# Altium footprint library SamacSys.PcbLib: 1008 footprints (part 40 of 63)
Each footprint in its own frame and in the unit in brackets; x right, y up, seen from the top. Pads: shape width x height; smd on the part's side, far side on the other; paste and mask are expansions set on the pad; w line width, h text height; cw(c..) or ccw(c..) is an arc to the next point about the centre after c.
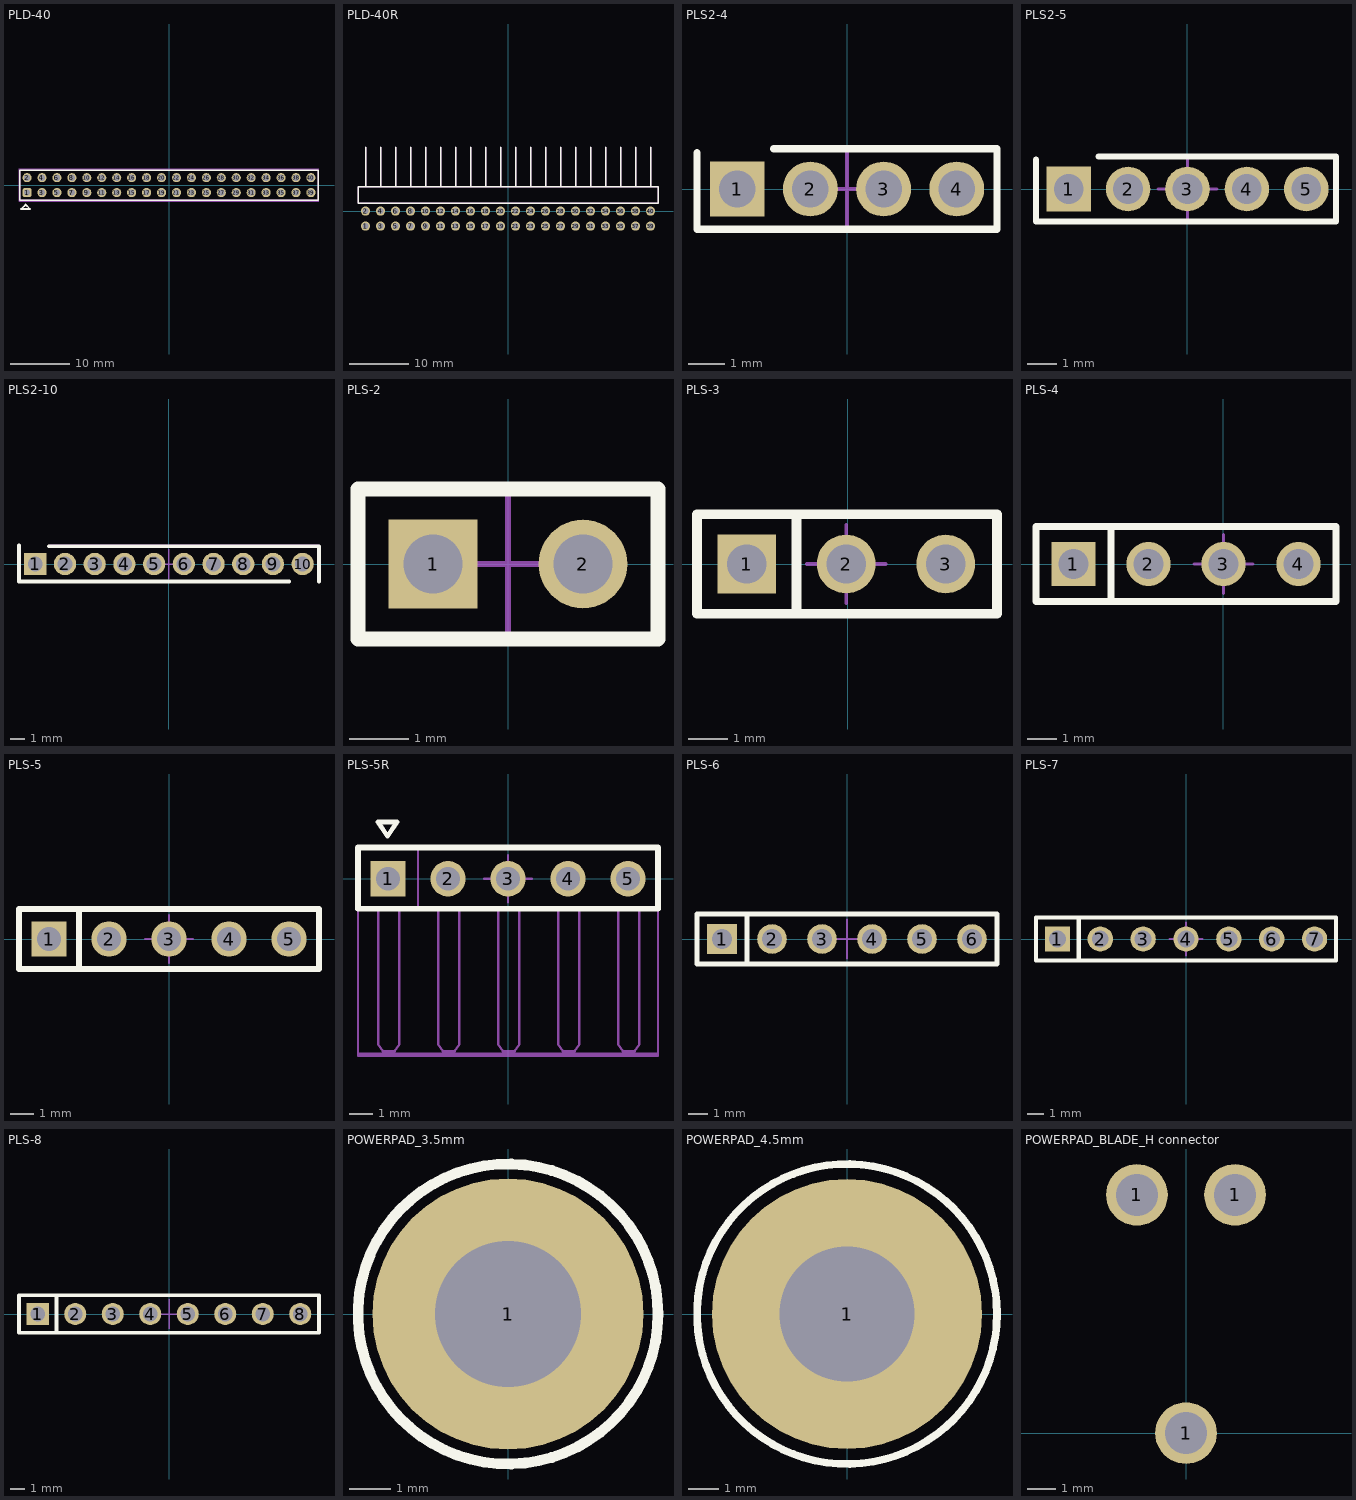
[diagram p39: the footprints below, top view; thin cyan lines are the x and y axes]

## PLD-40 [mm]
pads (40):
  rrect50% 1.55x1.55 hole 1.05: 1(-24.13,-1.27)
  round 1.55 hole 1.05: 2(-24.13,1.27) 3(-21.59,-1.27) 4(-21.59,1.27) 5(-19.05,-1.27) 6(-19.05,1.27) 7(-16.51,-1.27) 8(-16.51,1.27) 9(-13.97,-1.27) 10(-13.97,1.27) 11(-11.43,-1.27) 12(-11.43,1.27) 13(-8.89,-1.27) 14(-8.89,1.27) 15(-6.35,-1.27) 16(-6.35,1.27) 17(-3.81,-1.27) 18(-3.81,1.27) 19(-1.27,-1.27) 20(-1.27,1.27) 21(1.27,-1.27) 22(1.27,1.27) 23(3.81,-1.27) 24(3.81,1.27) 25(6.35,-1.27) 26(6.35,1.27) 27(8.89,-1.27) 28(8.89,1.27) 29(11.43,-1.27) 30(11.43,1.27) 31(13.97,-1.27) 32(13.97,1.27) 33(16.51,-1.27) 34(16.51,1.27) 35(19.05,-1.27) 36(19.05,1.27) 37(21.59,-1.27) 38(21.59,1.27) 39(24.13,-1.27) 40(24.13,1.27)
Top Overlay:
  lines w0.254: -25.4,-2.54 -25.4,2.57 25.4,2.57 25.4,-2.54 -25.4,-2.54
  lines w0.3: -25.146,-4.064 -23.622,-4.064 -24.384,-3.302 -25.146,-4.064
Top Assembly:
  lines w0.1: -25.5,-2.75 25.5,-2.75 25.5,2.75 -25.5,2.75 -25.5,-2.75
Top Courtyard:
  lines w0.1: -25.5,-2.75 -25.5,2.75 25.5,2.75 25.5,-2.75 -25.5,-2.75
Assembly:
  lines w0.254: -25.4,-2.54 25.4,-2.54 25.4,2.57 -25.4,2.57 -25.4,-2.54
3D body "User Library-PLD10.STEP": height 8.54, standoff -3, extent -25.4,-2.54 -12.7,2.54
3D body "User Library-PLD10.STEP": height 8.54, standoff -3, extent -12.7,-2.54 0,2.54
3D body "User Library-PLD10.STEP": height 8.54, standoff -3, extent 0,-2.54 12.7,2.54
3D body "User Library-PLD10.STEP": height 8.54, standoff -3, extent 12.7,-2.54 25.4,2.54

## PLD-40R [mm]
pads (40):
  round 1.55 hole 1.05: 1(-24.13,-2.54) 2(-24.13,0) 3(-21.59,-2.54) 4(-21.59,0) 5(-19.05,-2.54) 6(-19.05,0) 7(-16.51,-2.54) 8(-16.51,0) 9(-13.97,-2.54) 10(-13.97,0) 11(-11.43,-2.54) 12(-11.43,0) 13(-8.89,-2.54) 14(-8.89,0) 15(-6.35,-2.54) 16(-6.35,0) 17(-3.81,-2.54) 18(-3.81,0) 19(-1.27,-2.54) 20(-1.27,0) 21(1.27,-2.54) 22(1.27,0) 23(3.81,-2.54) 24(3.81,0) 25(6.35,-2.54) 26(6.35,0) 27(8.89,-2.54) 28(8.89,0) 29(11.43,-2.54) 30(11.43,0) 31(13.97,-2.54) 32(13.97,0) 33(16.51,-2.54) 34(16.51,0) 35(19.05,-2.54) 36(19.05,0) 37(21.59,-2.54) 38(21.59,0) 39(24.13,-2.54) 40(24.13,0)
Top Overlay:
  lines w0.254: -24.13,4.1 -24.13,10.8 ; -21.59,4.1 -21.59,10.8 ; -19.05,4.1 -19.05,10.8 ; -16.51,4.1 -16.51,10.8 ; -13.97,4.1 -13.97,10.8 ; -11.43,4.1 -11.43,10.8 ; -8.89,4.1 -8.89,10.8 ; -6.35,4.1 -6.35,10.8 ; -3.81,4.1 -3.81,10.8 ; -1.27,4.1 -1.27,10.8 ; 1.27,4.1 1.27,10.8 ; 3.81,4.1 3.81,10.8 ; 6.35,4.1 6.35,10.8 ; 8.89,4.1 8.89,10.8 ; 11.43,4.1 11.43,10.8 ; 13.97,4.1 13.97,10.8 ; 16.51,4.1 16.51,10.8 ; 19.05,4.1 19.05,10.8 ; 21.59,4.1 21.59,10.8 ; 24.13,4.1 24.13,10.8 ; -25.4,1.3 -25.4,4.1 25.4,4.1 25.4,1.3 -25.4,1.3
Assembly:
  lines w0.254: -24.13,4.1 -24.13,10.8 ; -21.59,4.1 -21.59,10.8 ; -19.05,4.1 -19.05,10.8 ; -16.51,4.1 -16.51,10.8 ; -13.97,4.1 -13.97,10.8 ; -11.43,4.1 -11.43,10.8 ; -8.89,4.1 -8.89,10.8 ; -6.35,4.1 -6.35,10.8 ; -3.81,4.1 -3.81,10.8 ; -1.27,4.1 -1.27,10.8 ; 1.27,4.1 1.27,10.8 ; 3.81,4.1 3.81,10.8 ; 6.35,4.1 6.35,10.8 ; 8.89,4.1 8.89,10.8 ; 11.43,4.1 11.43,10.8 ; 13.97,4.1 13.97,10.8 ; 16.51,4.1 16.51,10.8 ; 19.05,4.1 19.05,10.8 ; 21.59,4.1 21.59,10.8 ; 24.13,4.1 24.13,10.8 ; -25.4,1.3 25.4,1.3 25.4,4.1 -25.4,4.1 -25.4,1.3
3D body "2-826634-0.stp": height 5.36, standoff -3.39, extent -25.4,-2.955 25.4,10.7

## PLS2-4 [mm]
height 4.3
pads (4):
  rect 1.5x1.5 hole 1: 1(-3,0)
  round 1.5 hole 1: 2(-1,0) 3(1,0) 4(3,0)
Top Overlay:
  lines w0.2: -4.1,1 -4.1,-1.1 4.1,-1.1 4.1,1.1 -2,1.1
Countryard:
  lines w0.1: -1,0 1,0 ; 0,-1 0,1

## PLS2-5 [mm]
height 4.3
pads (5):
  rect 1.5x1.5 hole 1: 1(-4,0)
  round 1.5 hole 1: 2(-2,0) 3(0,0) 4(2,0) 5(4,0)
Top Overlay:
  lines w0.2: -5.1,1 -5.1,-1.1 5,-1.1 5,1.1 -3,1.1
Countryard:
  lines w0.1: -1,0 1,0 ; 0,-1 0,1

## PLS2-10 [mm]
height 4.3
pads (10):
  rect 1.5x1.5 hole 1: 1(-9,0)
  round 1.5 hole 1: 2(-7,0) 3(-5,0) 4(-3,0) 5(-1,0) 6(1,0) 7(3,0) 8(5,0) 9(7,0) 10(9,0)
Top Overlay:
  lines w0.25: -10.096,1.27 -10.096,-1.175 8.1,-1.175 ; -8.1,1.2 10.1,1.2 10.1,-1.175
Assembly:
  lines w0.1: -10.096,1.27 -10.096,-1.175 8.1,-1.175 ; -10.064,-1.27 -10.064,1.27 ; -8.096,1.27 10.1,1.27 10.1,-1.175
Countryard:
  lines w0.1: -10.096,1.27 -10.096,-1.175 8.1,-1.175 ; -8.096,1.27 10.1,1.27 10.1,-1.175 ; -1,0 1,0 ; 0,-1 0,1
3D body "User Library-PLS2-10.step": height 7, standoff -2, extent -10,-1 10,1

## PLS-2 [mm]
height 10
pads (2):
  rect 1.5x1.5 hole 1: 1(-1.27,0)
  round 1.5 hole 1: 2(1.27,0)
Top Overlay:
  lines w0.25: -2.54,-1.27 2.54,-1.27 2.54,1.27 -2.54,1.27 -2.54,-1.27
Assembly:
  lines w0.1: 0,-1.27 0,1.27 ; -2.54,-1.27 2.54,-1.27 2.54,1.27 -2.54,1.27 -2.54,-1.27
Countryard:
  lines w0.1: -1,0 1,0 ; 0,-1 0,1 ; -2.54,-1.27 -2.54,1.27 2.54,1.27 2.54,-1.27 -2.54,-1.27
3D body "PLS-2.step": height 8.6, standoff -3, extent -2.54,-1.27 2.54,1.27

## PLS-3 [mm]
height 10
pads (3):
  rect 1.5x1.5 hole 1: 1(-2.58,0)
  round 1.5 hole 1: 2(-0.04,0) 3(2.5,0)
Top Overlay:
  lines w0.25: -1.31,-1.27 -1.31,1.27 ; -3.85,-1.27 -3.85,1.27 3.81,1.27 3.81,-1.27 -3.85,-1.27
Assembly:
  lines w0.1: -1.31,-1.27 -1.31,1.27 ; -3.85,-1.27 -3.85,1.27 3.81,1.27 3.81,-1.27 -3.85,-1.27
Countryard:
  lines w0.1: -1.04,0 0.96,0 ; -0.04,-1 -0.04,1 ; -3.85,-1.27 -3.85,1.27 3.81,1.27 3.81,-1.27 -3.85,-1.27
3D body "User Library-PLS-3.step": height 8.54, standoff -3, extent -3.81,-1.27 3.81,1.27

## PLS-4 [mm]
height 10
pads (4):
  rect 1.5x1.5 hole 1: 1(-5.08,0)
  round 1.5 hole 1: 2(-2.54,0) 3(0,0) 4(2.54,0)
Top Overlay:
  lines w0.25: -3.81,-1.27 -3.81,1.27 ; -6.35,-1.27 -6.35,1.27 3.81,1.27 3.81,-1.27 -6.35,-1.27
Assembly:
  lines w0.1: -3.81,-1.27 -3.81,1.27 ; -6.35,-1.27 -6.35,1.27 3.81,1.27 3.81,-1.27 -6.35,-1.27
Countryard:
  lines w0.1: -1,0 1,0 ; 0,-1 0,1 ; -6.35,-1.27 -6.35,1.27 3.81,1.27 3.81,-1.27 -6.35,-1.27
3D body "PLS-4.step": height 8.6, standoff -3, extent -6.35,-1.27 3.81,1.27

## PLS-5 [mm]
height 10
pads (5):
  rect 1.5x1.5 hole 1: 1(-5.08,0)
  round 1.5 hole 1: 2(-2.54,0) 3(0,0) 4(2.54,0) 5(5.08,0)
Top Overlay:
  lines w0.25: -3.81,-1.27 -3.81,1.27 ; -6.35,-1.27 6.35,-1.27 6.35,1.27 -6.35,1.27 -6.35,-1.27
Assembly:
  lines w0.1: -3.81,-1.27 -3.81,1.27 ; -6.35,-1.27 6.35,-1.27 6.35,1.27 -6.35,1.27 -6.35,-1.27
Countryard:
  lines w0.1: -1,0 1,0 ; 0,-1 0,1 ; -6.35,-1.27 6.35,-1.27 6.35,1.27 -6.35,1.27 -6.35,-1.27
3D body "PLS-5.step": height 8.54, standoff -3, extent -6.35,-1.27 6.35,1.27

## PLS-5R [mm]
height 10
pads (5):
  rect 1.5x1.5 hole 1: 1(-5.08,0)
  round 1.5 hole 1: 2(-2.54,0) 3(0,0) 4(2.54,0) 5(5.08,0)
Top Overlay:
  lines w0.2: -5.5,2.4 -4.7,2.4 -5.1,1.8 -5.5,2.4
  lines w0.25: -6.35,1.3 -6.35,-1.27 6.35,-1.27 6.35,1.3 ; -6.35,1.33 6.35,1.33
Top Assembly:
  lines w0.1: -5.5,-1.27 -5.5,-7 -5.3,-7.3 -4.8,-7.3 -4.6,-7 -4.6,-1.27 ; -2.96,-1.27 -2.96,-7 -2.76,-7.3 -2.26,-7.3 -2.06,-7 -2.06,-1.27 ; -0.42,-1.27 -0.42,-7 -0.22,-7.3 0.28,-7.3 0.48,-7 0.48,-1.27 ; 2.12,-1.27 2.12,-7 2.32,-7.3 2.82,-7.3 3.02,-7 3.02,-1.27 ; 4.66,-1.27 4.66,-7 4.86,-7.3 5.36,-7.3 5.56,-7 5.56,-1.27
Assembly:
  lines w0.1: -3.81,-1.27 -3.81,1.27 ; -6.35,-7.4 -6.35,1.27 6.35,1.27 6.35,-7.4 -6.35,-7.4
Countryard:
  lines w0.1: -1,0 1,0 ; 0,-1 0,1 ; -6.35,-7.5 -6.35,1.27 6.35,1.27 6.35,-7.5 -6.35,-7.5
3D body "User Library-PLS-5R-1.step": height 5.45, standoff -3, extent -6.35,-7.42 6.35,1.2

## PLS-6 [mm]
height 10
pads (6):
  rect 1.5x1.5 hole 1: 1(-6.35,0)
  round 1.5 hole 1: 2(-3.81,0) 3(-1.27,0) 4(1.27,0) 5(3.81,0) 6(6.35,0)
Top Overlay:
  lines w0.25: -5.08,-1.27 -5.08,1.27 ; -7.62,-1.27 7.62,-1.27 7.62,1.27 -7.62,1.27 -7.62,-1.27
Assembly:
  lines w0.1: -5.08,-1.27 -5.08,1.27 ; -7.62,-1.27 7.62,-1.27 7.62,1.27 -7.62,1.27 -7.62,-1.27
Countryard:
  lines w0.1: -1,0 1,0 ; 0,-1 0,1 ; -7.62,-1.27 7.62,-1.27 7.62,1.27 -7.62,1.27 -7.62,-1.27
3D body "PLS-6.STEP": height 8.9, standoff -2.9, extent -7.62,-1.27 7.62,1.27

## PLS-7 [mm]
height 10
pads (7):
  rect 1.5x1.5 hole 1: 1(-7.62,0)
  round 1.5 hole 1: 2(-5.08,0) 3(-2.54,0) 4(0,0) 5(2.54,0) 6(5.08,0) 7(7.62,0)
Top Overlay:
  lines w0.25: -6.35,-1.27 -6.35,1.27 ; -8.89,-1.27 8.89,-1.27 8.89,1.27 -8.89,1.27 -8.89,-1.27
Assembly:
  lines w0.1: -6.35,-1.27 -6.35,1.27 ; -8.89,-1.27 8.89,-1.27 8.89,1.27 -8.89,1.27 -8.89,-1.27
Countryard:
  lines w0.1: -1,0 1,0 ; 0,-1 0,1 ; -8.89,-1.27 8.89,-1.27 8.89,1.27 -8.89,1.27 -8.89,-1.27
3D body "PLS-7.step": height 8.6, standoff -3, extent -8.89,-1.27 8.89,1.27

## PLS-8 [mm]
height 10
pads (8):
  rect 1.5x1.5 hole 1: 1(-8.89,0)
  round 1.5 hole 1: 2(-6.35,0) 3(-3.81,0) 4(-1.27,0) 5(1.27,0) 6(3.81,0) 7(6.35,0) 8(8.89,0)
Top Overlay:
  lines w0.25: -7.62,-1.27 -7.62,1.27 ; -10.16,-1.27 10.16,-1.27 10.16,1.27 -10.16,1.27 -10.16,-1.27
Assembly:
  lines w0.1: -7.62,-1.27 -7.62,1.27 ; 5.08,-1.27 -10.16,-1.27 -10.16,1.27 5.08,1.27 ; 10.16,-1.27 10.16,1.27
Countryard:
  lines w0.1: -1,0 1,0 ; 0,-1 0,1 ; 5.08,-1.27 -10.16,-1.27 -10.16,1.27 5.08,1.27 ; 10.16,-1.27 10.16,1.27
3D body "PLS-6.STEP": height 8.9, standoff -2.9, extent -5.08,-1.27 10.16,1.27
3D body "PLS-6.STEP": height 8.9, standoff -2.9, extent -10.16,-1.27 5.08,1.27

## POWERPAD_3.5mm [mm] "H3.5 / OUT6.5"
pads (1):
  round 6.5 hole 3.5: 1(0,0)
Top Overlay:
  circle w0.254: c0,0 r3.6

## POWERPAD_4.5mm [mm] "H4.5 / OUT9"
pads (1):
  round 9 hole 4.5 unplated: 1(0,0)
Top Overlay:
  circle w0.254: c0,0 r5

## POWERPAD_BLADE_H connector [mm]
pads (3):
  round 2.2 hole 1.5: 1(-1.75,8.5) 1(0,0) 1(1.75,8.5)
Countryard:
  lines w0.1: -1,0 1,0 ; 0,-1 0,1